# Altium schematic symbol library 08055C104KAT4A.SchLib: 1 symbol
Pins are listed as number, name and electrical type; pins without a type are passive.

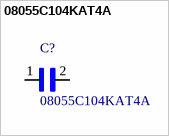
[diagram p0: symbol 08055C104KAT4A]

## 08055C104KAT4A
designator C?
0805 100 nF 50 V Â±10 % Tolerance X7R SMT Multilayer Ceramic Capacitor; MF: AVX; Package: 2012 AVX; Digi-Key_Part_Number: 478-10836-1-ND; Digi-Key_Purchase_URL: https://www.digikey.com.tr/product-detail/en/avx-corporation/08055C104KAT4A/478-10836-1-ND/7536355?utm_source=snapeda&utm_medium=aggregator&utm_campaign=symbol; SnapEDA_Link: https://www.snapeda.com/parts/08055C104KAT4A/AVX%20/%20Kyocera/view-part/?ref=snap; MP: 08055C104KAT4A; Value: *
footprint *CAPC2012X94N
pins: 1, 2